# Altium footprint library Resistor.PcbLib: 85 footprints (part 1 of 6)
Each footprint in its own frame and in the unit in brackets; x right, y up, seen from the top. Pads: shape width x height; smd on the part's side, far side on the other; paste and mask are expansions set on the pad; w line width, h text height; cw(c..) or ccw(c..) is an arc to the next point about the centre after c.
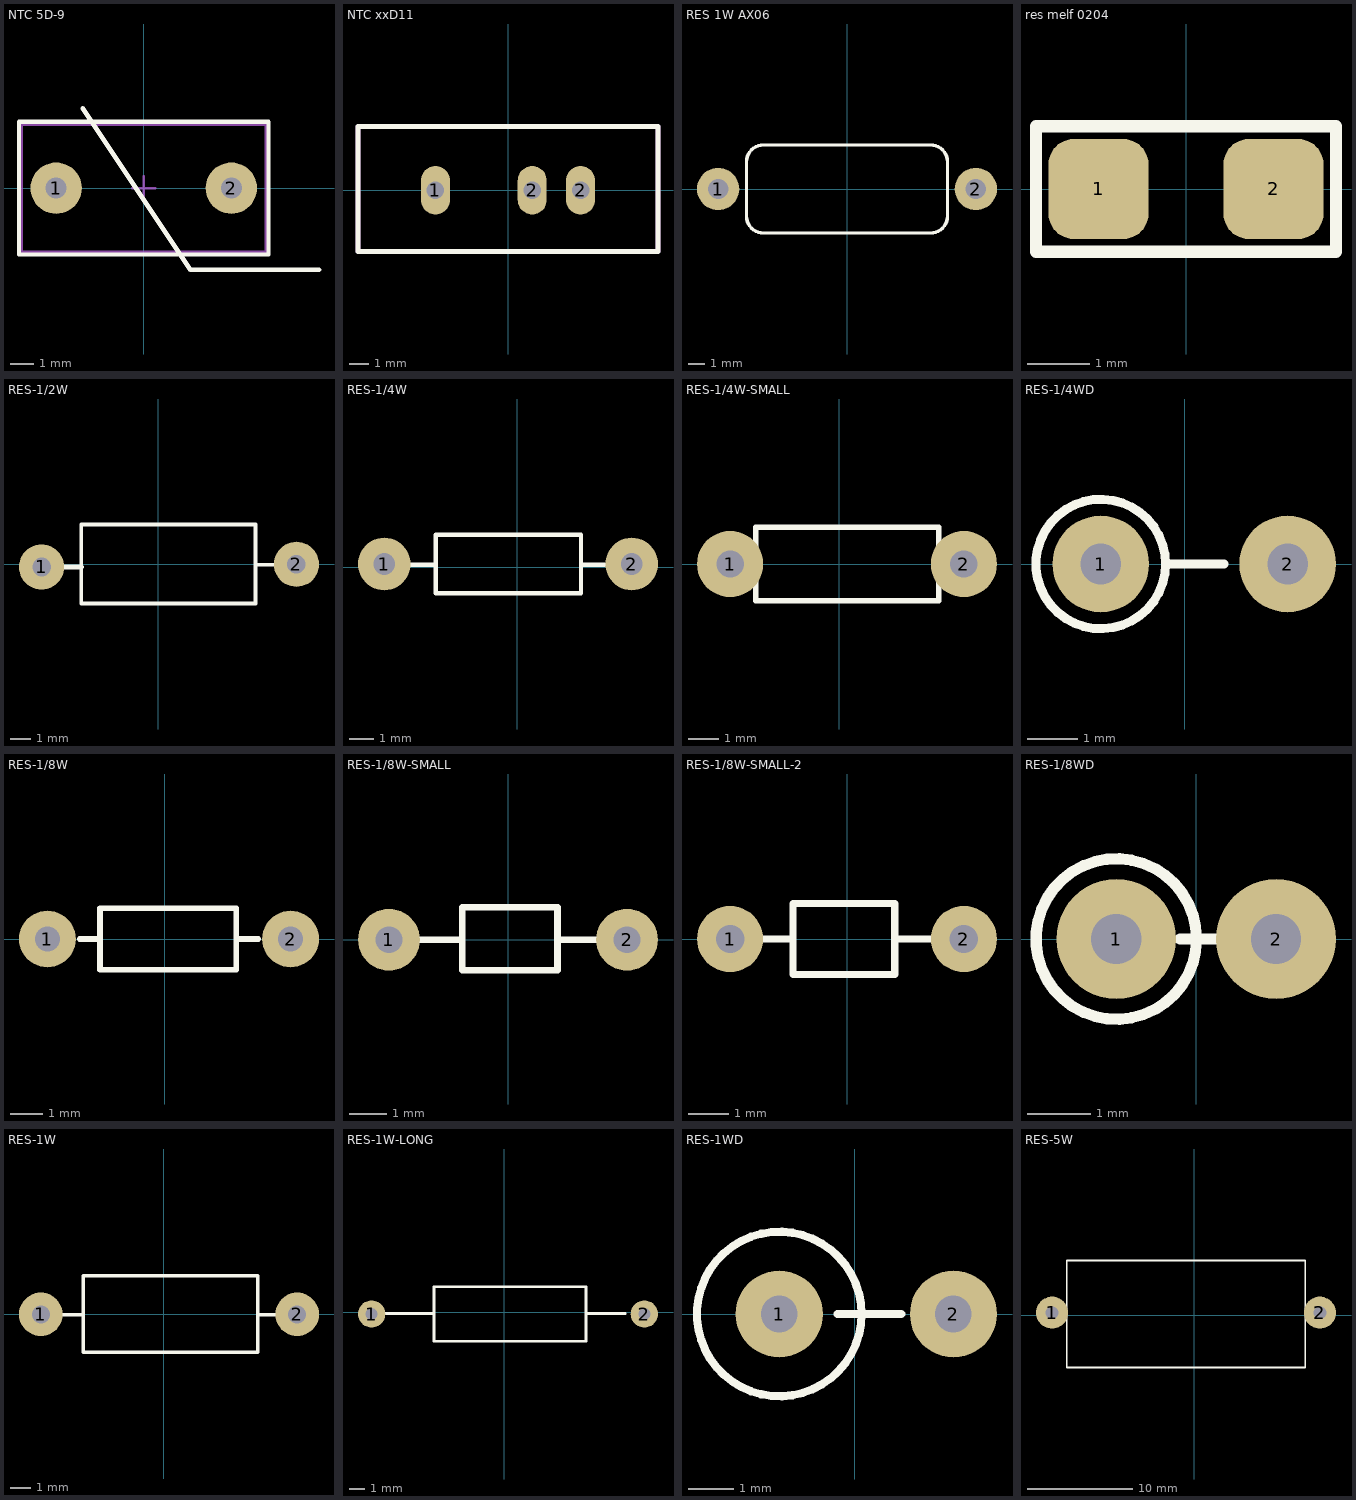
[diagram p0: the footprints below, top view; thin cyan lines are the x and y axes]

## NTC 5D-9 [mm]
pads (2):
  round 2.2 hole 0.9: 1(-3.75,0) 2(3.75,0)
Top Overlay:
  lines w0.178: -5.339,-2.839 5.339,-2.839 5.339,2.839 -5.339,2.839 -5.339,-2.839
  lines w0.2: -2.615,3.423 2,-3.5 7.5,-3.5
Top Designator:
  text ".Designator" at -2.624,-0.382 h1.52
Mechanical 12:
  lines w0.1: -0.5,0 0.5,0 ; 0,-0.5 0,0.5
Mechanical 15:
  lines w0.178: -5.25,-2.75 5.25,-2.75 5.25,2.75 -5.25,2.75 -5.25,-2.75
3D body: height 11.25, standoff 0.75, extent -5.25,-2.75 5.25,2.75
3D body "ceramico.STEP": height 9.14, standoff -1.05, extent -4,-1.178 4.001,1.212

## NTC xxD11 [mm]
pads (3):
  oval 1.5x2.5 hole 0.9: 1(-3.75,0) 2(1.25,0) 2(3.75,0)
Top Overlay:
  lines w0.254: -7.747,-3.175 7.747,-3.175 7.747,3.302 -7.747,3.302 -7.747,-3.175
Top Designator:
  text ".Designator" at -3.71,-0.28 h1.52
Mechanical 15:
  lines w0.254: -7.747,-3.175 -7.747,3.302 7.747,3.302 7.747,-3.175 -7.747,-3.175
3D body "User Library-S238.step": height 20.75, standoff -24.52, extent -7.75,-3.242 7.75,3.242

## RES 1W AX06 [mm] "RESISTOR 1 WATT, AXIAL0.6"
height 5
pads (2):
  round 2.5 hole 1.2: 1(-7.62,0) 2(7.62,0)
Top Overlay:
  lines w0.2: -5.946,-1.6 ccw(c-4.946,-1.6) -4.946,-2.6 4.946,-2.6 ccw(c4.946,-1.6) 5.946,-1.6 5.946,1.6 ccw(c4.946,1.6) 4.946,2.6 -4.946,2.6 ccw(c-4.946,1.6) -5.946,1.6 -5.946,-1.6
Top Designator:
  text ".Designator" at -3.71,-0.344 h1.52
3D body "User Library-RES-1W.STEP": height 5, standoff -3, extent -7.97,-2.494 7.97,2.506

## res melf 0204 [mm] "LMERW330"
pads (2):
  rrect50% 1.6x1.6 smd paste-0.1 mask+0.075: 1(-1.4,0) 2(1.4,0)
Top Overlay:
  lines w0.2: -2.4,-1 2.4,-1 2.4,1 -2.4,1 -2.4,-1
Top Designator:
  text ".Designator" at -3.71,-0.344 h1.52
3D body "Mini-MELF 0204.step": height 1.46, standoff 0.06, extent -1.8,-0.7 1.8,0.7

## RES-1/2W [mil]
height 100
pads (2):
  round 85 hole 35: 1(-220,-5) 2(260,0)
Top Overlay:
  lines w7: 183,-1 221,-1 ; -145,-73.81 -145,75 183,75 183,-73.81 -145,-73.81
  lines w10: -195,-5 -145,-5
Top Designator:
  text ".Designator" at -126.08,-12.95 h60
3D body "User Library-Metal film resistor0_5W.step": height 121.06, standoff -118.11, extent -230,-59.77 270,55.87

## RES-1/4W [mil]
height 100
pads (2):
  round 85 hole 35: 1(-215,5) 2(185,5)
Top Overlay:
  lines w7: -173,4 -132,4 ; 103,4 141,4 ; -132,-42.24 -132,52.25 103,52.25 103,-42.24 -132,-42.24
Top Designator:
  text ".Designator" at -161.08,-8.54 h60
3D body "User Library-Res40-Axial Short 0_25W-0_1R.step": height 95, standoff -78.74, extent -226.81,-41.9 196.82,51.9

## RES-1/4W-SMALL [mil]
height 100
pads (2):
  round 85 hole 35: 1(-140,0) 2(160,0)
Top Overlay:
  lines w7: -148,-1 -107,-1 ; 128,-1 166,-1 ; -107,-47.24 -107,47.25 128,47.25 128,-47.24 -107,-47.24
Top Designator:
  text ".Designator" at -136.08,-13.54 h60
3D body "User Library-R-Axial-0_25W-7_62.step": height 97.35, standoff -146.85, extent -151.81,-47.42 171.82,47.42

## RES-1/4WD [mm]
height 2.54
pads (2):
  round 1.905 hole 0.8: 1(-1.651,0) 2(2.032,0)
Top Overlay:
  circle w0.178: c-1.651,0 r1.276
  lines w0.178: -0.375,0 0.782,0
Top Designator:
  text ".Designator" at -3.675,-0.344 h1.52
3D body "User Library-RESAD375W60L650D230_0_25W.STEP": height 9.64, standoff -2.66, extent -2.846,-1.143 2.346,1.157

## RES-1/8W [mil]
height 100
pads (2):
  round 70 hole 31: 1(-145,0) 2(155,0)
Top Overlay:
  lines w7: -105,0 -80,0 ; 88,0 115,0 ; -80,-38 88,-38 88,38 -80,38 -80,-38
Top Designator:
  text ".Designator" at -141.08,-13.54 h60
3D body "SW3DPS-RESISTOR 7_62MM DIP-DEFAULT.STEP": height 79.08, standoff -78.11, extent -154.45,-40 164.45,38.74

## RES-1/8W-SMALL [mil] "R 1/8W, 2 pin, 200mil"
height 100
pads (2):
  round 65 hole 28: 1(-125,0) 2(125,0)
Top Overlay:
  lines w7: -95,0 -48,0 ; 55,0 95,0 ; -48,-32 -48,34 52,34 52,-32 -48,-32
Top Designator:
  text ".Designator" at -146.08,-13.04 h60
3D body "SW3dPS-Res_Normal (0.25W).STEP": height 76.31, standoff -78.11, extent -135,-35.21 135,36.74

## RES-1/8W-SMALL-2 [mil] "R 1/8W, 2 pin, 200mil"
height 100
pads (2):
  round 65 hole 28: 1(-115,0) 2(115,0)
Top Overlay:
  lines w7: -100,0 -53,0 ; 50,0 90,0 ; -53,-35 47,-35 47,35 -53,35 -53,-35
Top Designator:
  text ".Designator" at -146.08,-13.54 h60
3D body: height 74.8, standoff -78.74, extent -125.98,-35 125.98,35.87

## RES-1/8WD [mm]
height 2.54
pads (2):
  round 1.905 hole 0.8: 1(-1.27,0) 2(1.27,0)
Top Overlay:
  circle w0.178: c-1.27,0 r1.276
  lines w0.178: -0.254,0 0.381,0
Top Designator:
  text ".Designator" at -3.866,-0.344 h1.52
3D body "SW3dPS-Res_Stand.STEP": height 7.3, standoff -1.45, extent -2.159,-0.914 1.553,0.914

## RES-1W [mil]
height 100
pads (2):
  round 85 hole 35: 1(-240,0) 2(260,0)
Top Overlay:
  lines w7: -198,-1 -157,-1 ; 183,-1 221,-1 ; -157,-73.81 183,-73.81 183,75 -157,75 -157,-73.81
Top Designator:
  text ".Designator" at -136.08,-12.95 h60
3D body "User Library-Res50-Axial 0_5W-3_3K.step": height 188.98, standoff -180.12, extent -254.76,-73.82 274.77,73.82

## RES-1W-LONG [mil]
height 100
pads (2):
  round 70 hole 31: 1(-340,-5) 2(360,-5)
Top Overlay:
  lines w7: -313,-4 -180,-4 ; 210,-4 311,-4 ; -180,-75 210,-75 210,65 -180,65 -180,-75
Top Designator:
  text ".Designator" at -136.08,-18.54 h60
3D body "SW3dPS-Resistor 5-band.STEP": height 142, standoff -125, extent -335.75,-69.52 365.75,61.52

## RES-1WD [mm]
height 2.54
pads (2):
  round 1.905 hole 0.8: 1(-1.651,0) 2(2.159,0)
Top Overlay:
  circle w0.178: c-1.651,0 r1.8
  lines w0.178: -0.381,0 1.016,0
Top Designator:
  text ".Designator" at -3.874,-0.344 h1.52
3D body "SW3DPS-0_5W METAL FILM RESISTOR-DEFAULT.STEP": height 12.65, standoff -5.05, extent -3.429,-1.688 2.671,1.688

## RES-5W [mil] "R5W , 2 pin, 400 x 950mil"
height 400
pads (2):
  round 120 hole 47.24: 1(-530,10) 2(470,10)
Top Overlay:
  lines w7: -475,-195 415,-195 415,205 -475,205 -475,-195
Top Designator:
  text ".Designator" at -176.08,-8.54 h60
3D body "User Library-5W Resistor.STEP": height 362.6, standoff -98.43, extent -549.68,-185 489.69,196.89